# Altium footprint library Vibration_Datalogger.PcbLib: 76 footprints (part 1 of 5)
Each footprint in its own frame and in the unit in brackets; x right, y up, seen from the top. Pads: shape width x height; smd on the part's side, far side on the other; paste and mask are expansions set on the pad; w line width, h text height; cw(c..) or ccw(c..) is an arc to the next point about the centre after c.
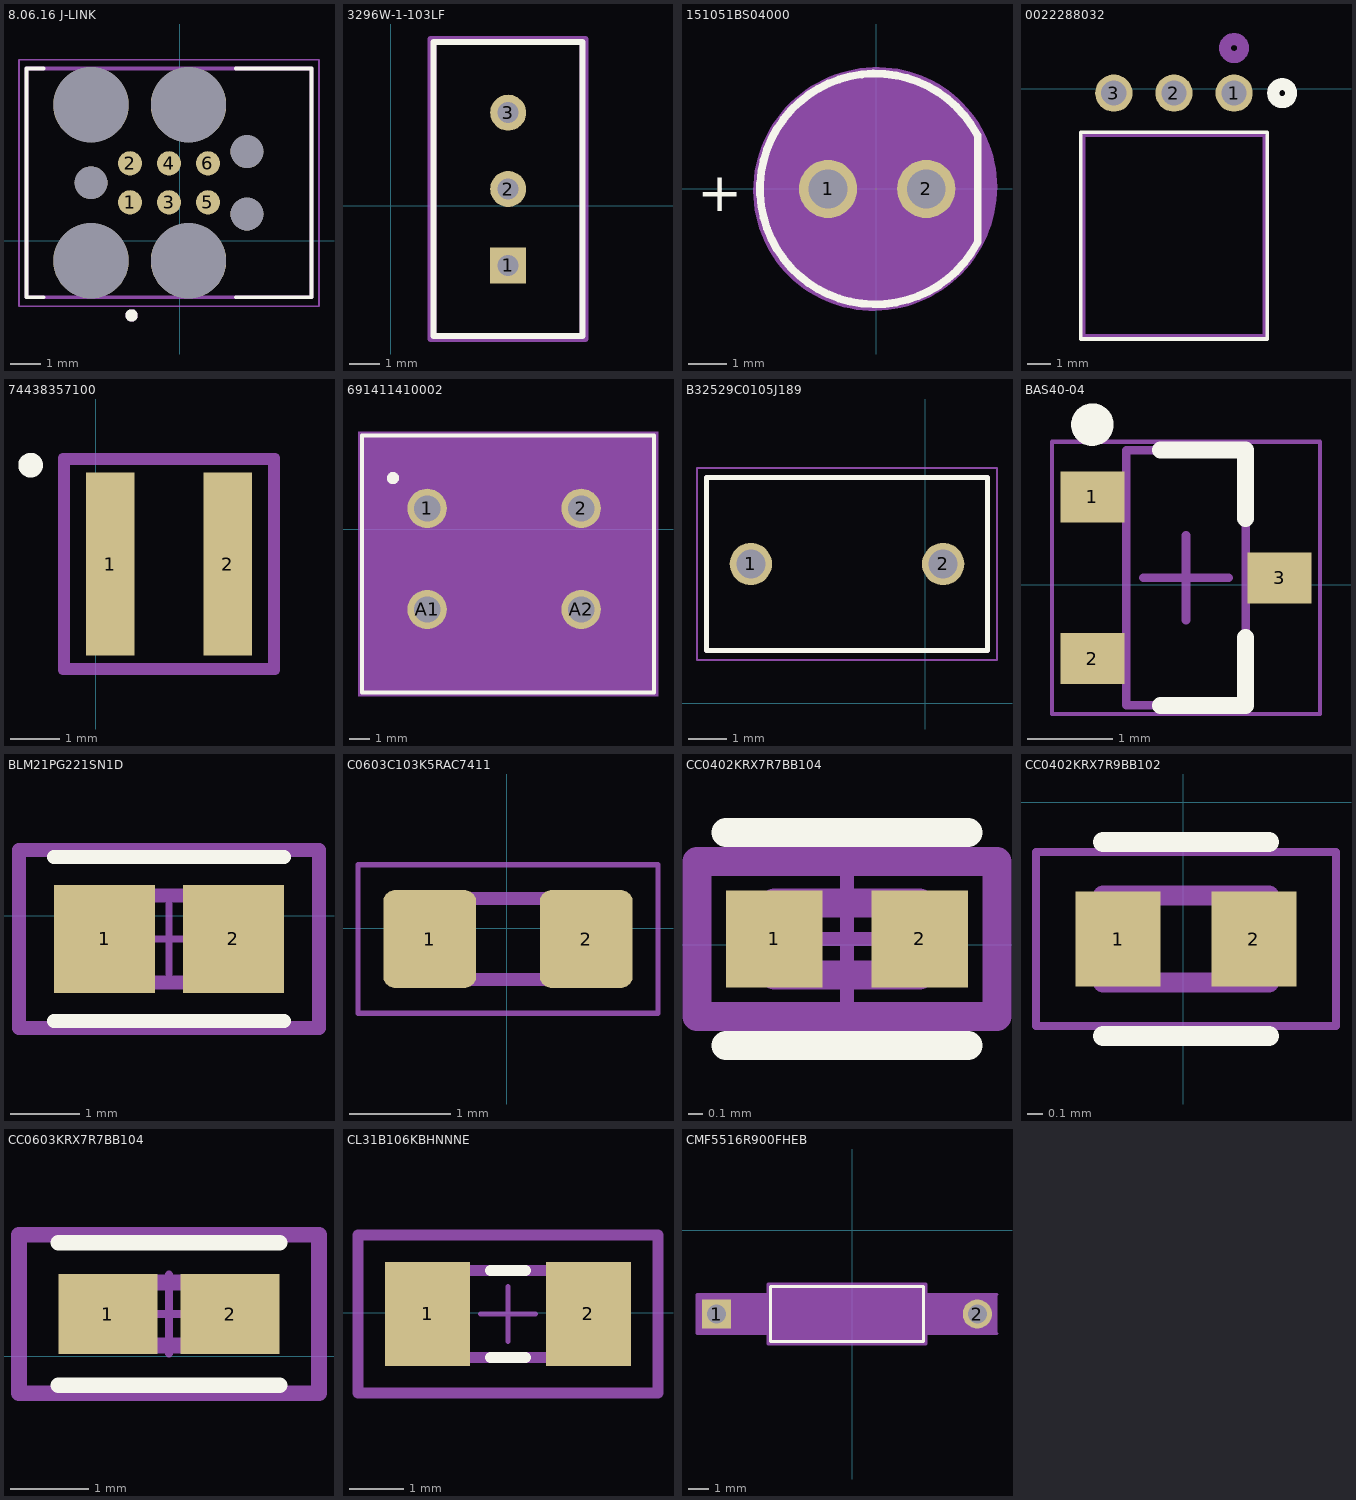
[diagram p0: the footprints below, top view; thin cyan lines are the x and y axes]

## 8.06.16 J-LINK [mm] "6-pin Needle Adapter (8.06.16)"
pads (13):
  round 0.787 smd paste-1: 1(-1.614,1.253) 2(-1.614,2.523) 3(-0.344,1.253) 4(-0.344,2.523) 5(0.926,1.253) 6(0.926,2.523)
  round 2.451 hole 2.451 unplated: ""(-2.884,-0.652) ""(-2.884,4.428) ""(0.291,-0.652) ""(0.291,4.428)
  round 1.067 hole 1.067 unplated: ""(-2.884,1.888) ""(2.196,0.872) ""(2.196,2.904)
Top Overlay:
  circle w0.2: c-1.563,-2.43 r0.1
  lines w0.127: -4.43,-1.839 -4.98,-1.839 -4.98,5.616 -4.43,5.616 ; 1.836,-1.839 4.291,-1.839 4.291,5.616 1.836,5.616
Mechanical 13:
  circle w0.2: c-1.563,-2.43 r0.1
  lines w0.127: -4.98,-1.839 -4.98,5.616 4.291,5.616 4.291,-1.839 -4.98,-1.839
Mechanical 15:
  lines w0.05: -5.23,-2.127 -5.23,5.904 4.541,5.904 4.541,-2.127 -5.23,-2.127

## 3296W-1-103LF [mm] "TRIMMER 10K OHM 0.5W PC PIN TOP"
pads (3):
  rect 1.2x1.2 hole 0.7 paste-1000 mask+0: 1(3.907,-1.979)
  round 1.2 hole 0.7 paste-1000 mask+0: 2(3.907,0.561) 3(3.907,3.101)
Top Overlay:
  lines w0.2: 1.422,-4.329 6.382,-4.329 6.382,5.451 1.422,5.451 1.422,-4.329
Mechanical 5:
  lines w0.2: 1.322,-4.429 6.482,-4.429 6.482,5.551 1.322,5.551 1.322,-4.429
  text ".Designator" at 7.778,-0.963 h1
Mechanical 13:
  lines w0.2: 1.422,-4.329 6.382,-4.329 6.382,5.451 1.422,5.451 1.422,-4.329
Mechanical 15:
  lines w0.2: 1.322,-4.429 6.482,-4.429 6.482,5.551 1.322,5.551 1.322,-4.429
Mechanical 16:
  lines w0.1: 3.402,0.561 4.402,0.561 ; 3.902,0.061 3.902,1.061
3D body "Res_Bourns_3296W-1-501RLF_eec.STEP": height 0.25, standoff 0, extent 1.322,-4.429 6.482,5.551

## 151051BS04000 [mm] "LED BLUE DIFFUSED 5MM ROUND T/H"
pads (2):
  round 1.508 hole 1: 1(-1.245,-0.008) 2(1.295,-0.008)
Top Overlay:
  lines w0.2: 2.614,-1.409 cw(c-0.022,-0.008) 2.614,1.393 ; 2.625,-1.388 2.625,1.372
  text "+" at -4.635,-0.59 h1.02
Mechanical 13:
  circle w0.1: c0.025,-0.008 r2.5
  lines w0.1: 2.518,-1.46 cw(c0.004,-0.008) 2.518,1.444 ; 2.525,-1.448 2.525,1.432
  text "+" at -4.642,-0.577 h1.02
Mechanical 15:
  region: 0.241,3.133 0.401,3.118 0.559,3.095 0.717,3.063 0.872,3.023 1.025,2.975 1.176,2.92 1.323,2.857 1.467,2.786 1.607,2.707 1.743,2.622 1.874,2.53 2,2.431 2.121,2.326 2.237,2.214 2.346,2.097 2.449,1.974 2.546,1.846 2.636,1.713 2.719,1.576 2.795,1.435 2.863,1.289 2.924,1.141 2.977,0.99 3.022,0.836 3.059,0.68 3.088,0.522 3.108,0.363 3.121,0.203 3.125,0.042 3.121,-0.124 3.108,-0.289 3.086,-0.453 3.057,-0.616 3.018,-0.778 2.972,-0.937 2.917,-1.093 2.854,-1.246 2.784,-1.396 2.706,-1.542 2.62,-1.684 2.527,-1.821 2.427,-1.953 2.32,-2.08 2.207,-2.201 2.088,-2.316 1.963,-2.425 1.833,-2.527 1.697,-2.623 1.557,-2.711 1.412,-2.792 1.264,-2.865 1.112,-2.93 0.956,-2.988 0.798,-3.037 0.638,-3.078 0.475,-3.111 0.311,-3.135 0.146,-3.151 -0.024,-3.158 -0.027,-3.158 -0.186,-3.156 -0.349,-3.146 -0.512,-3.127 -0.674,-3.1 -0.834,-3.064 -0.992,-3.02 -1.148,-2.967 -1.3,-2.906 -1.449,-2.838 -1.594,-2.761 -1.735,-2.677 -1.871,-2.585 -2.002,-2.487 -2.128,-2.382 -2.248,-2.27 -2.362,-2.152 -2.47,-2.028 -2.57,-1.898 -2.664,-1.764 -2.751,-1.624 -2.83,-1.481 -2.901,-1.333 -2.965,-1.182 -3.02,-1.027 -3.067,-0.87 -3.106,-0.711 -3.136,-0.549 -3.158,-0.387 -3.171,-0.223 -3.175,-0.059 -3.171,0.11 -3.157,0.279 -3.135,0.447 -3.104,0.613 -3.064,0.778 -3.015,0.94 -2.958,1.1 -2.892,1.256 -2.819,1.408 -2.737,1.557 -2.648,1.701 -2.551,1.84 -2.447,1.973 -2.336,2.101 -2.218,2.223 -2.094,2.339 -1.964,2.447 -1.829,2.549 -1.688,2.644 -1.543,2.731 -1.393,2.81 -1.239,2.881 -1.082,2.943 -0.921,2.998 -0.758,3.043 -0.593,3.081 -0.426,3.109 -0.258,3.128 -0.089,3.139 0.076,3.14
3D body "Download_STP_WL-TMRC-5mm+%28rev1%29.stp": height 18.7, standoff -16.4, extent -3.052,-2.957 2.348,2.942

## 0022288032 [mil] "CONN HEADER R/A 3POS 2.54MM"
pads (3):
  round 62 hole 42: 1(440,-7.64) 2(340,-7.64) 3(240,-7.64)
Top Overlay:
  lines w6: 185,-416.64 495,-416.64 495,-72.64 185,-72.64 185,-416.64
  lines w20: 505,-7.64 ccw(c520,-7.64) 535,-7.64 ccw(c520,-7.64) 505,-7.64
Bottom Overlay:
  lines w20: 505,-7.64 ccw(c520,-7.64) 535,-7.64 ccw(c520,-7.64) 505,-7.64
Mechanical 13:
  lines w6: 190,-411.64 490,-411.64 490,-77.64 190,-77.64 190,-411.64
  lines w20: 425,67.36 ccw(c440,67.36) 455,67.36 ccw(c440,67.36) 425,67.36
3D body "0022288032.stp": height 109, standoff -124, extent 185,-411.64 485,5.36

## 970120154 [mm] "HEX STANDOFF M2.5 BRASS 12MM"
3D body "970120154.stp": height 12, standoff 0, extent -2.897,-2.54 2.877,2.46

## 74438357100 [mm] "10 µH Shielded Molded Inductor 2.7 A"
pads (2):
  rect 0.98x3.7 smd: 1(0.299,-3.586) 2(2.669,-3.586)
Top Overlay:
  circle w0.3: c-1.316,-1.586 r0.1
Mechanical 13:
  lines w0.1: -0.566,-5.636 3.534,-5.636 3.534,-1.536 -0.566,-1.536 -0.566,-5.636
  lines w0.2: -0.666,-5.736 3.634,-5.736 3.634,-1.436 -0.666,-1.436 -0.666,-5.736
3D body "step_temp.STEP": height 3.23, standoff 0.13, extent -0.62,-5.62 3.48,-1.52

## 691411410002 [mm] "TERM BLK 2P SIDE ENT 7.62MM PCB"
pads (4):
  round 1.95 hole 1.3 mask+0.102: 1(6.985,1.036) 2(14.605,1.036) A1(6.985,-3.964) A2(14.605,-3.964)
Top Overlay:
  circle w0.4: c5.295,2.536 r0.1
  lines w0.2: 3.765,-8.064 3.765,4.636 18.205,4.636 18.205,-8.064 3.765,-8.064
Mechanical 13:
  lines w0.1: 3.865,-7.964 3.865,4.536 18.105,4.536 18.105,-7.964 3.865,-7.964
  text "1" at 6.485,-2.064 h1.27
Mechanical 15:
  region: 18.405,-8.264 3.565,-8.264 3.565,4.836 18.405,4.836
3D body "691411410002.stp": height 13.9, standoff -3.6, extent 3.58,-7.95 17.774,4.55

## B32529C0105J189 [mm] "CAP FILM 1UF 5% 63VDC RADIAL"
pads (2):
  round 1.1 hole 0.75: 1(-4.532,3.616) 2(0.468,3.616)
Top Overlay:
  lines w0.127: -5.682,1.366 1.618,1.366 1.618,5.866 -5.682,5.866 -5.682,1.366
Mechanical 13:
  lines w0.127: -5.682,1.366 -5.682,5.866 1.618,5.866 1.618,1.366 -5.682,1.366
Mechanical 15:
  lines w0.05: -5.932,1.116 -5.932,6.116 1.868,6.116 1.868,1.116 -5.932,1.116
3D body "step_temp.STEP": height 9.5, standoff -6, extent -5.682,1.366 1.618,5.866

## BAS40-04 [mm] "DIODE ARR SCHOTT 40V 200MA SOT23"
pads (3):
  rect 0.75x0.6 smd: 1(-3.406,1.032) 2(-3.406,-0.868) 3(-1.206,0.082)
Top Overlay:
  circle w0.25: c-3.406,1.882 r0.125
  lines w0.2: -2.606,-1.418 -1.606,-1.418 -1.606,-0.618 ; -2.606,1.582 -1.606,1.582 -1.606,0.782
Mechanical 13:
  lines w0.1: -3.006,-1.418 -1.606,-1.418 -1.606,1.582 -3.006,1.582 -3.006,-1.418
Mechanical 15:
  lines w0.05: -3.881,-1.518 -0.731,-1.518 -0.731,1.682 -3.881,1.682 -3.881,-1.518
  lines w0.1: -2.806,0.082 -1.806,0.082 ; -2.306,-0.418 -2.306,0.582
3D body: height 1.1, standoff 0.1, extent -3.006,-1.418 -1.606,1.582

## BLM21PG221SN1D [mm] "FERRITE BEAD 220 OHM 0805 1LN"
pads (2):
  rect 1.455x1.556 smd paste+0 mask+0: 1(-4.873,-0.331) 2(-3.021,-0.331)
Top Overlay:
  lines w0.2: -5.6,-1.509 -2.294,-1.509 ; -5.6,0.847 -2.294,0.847
Mechanical 5:
  lines w0.2: -6.1,-1.609 -1.794,-1.609 -1.794,0.947 -6.1,0.947 -6.1,-1.609
  text ".Designator" at -6.106,1.381 h1
Mechanical 13:
  lines w0.2: -4.947,-0.956 -2.947,-0.956 -2.947,0.294 -4.947,0.294 -4.947,-0.956
Mechanical 15:
  lines w0.2: -6.1,-1.609 -1.794,-1.609 -1.794,0.947 -6.1,0.947 -6.1,-1.609
Mechanical 16:
  lines w0.1: -4.447,-0.331 -3.447,-0.331 ; -3.947,-0.831 -3.947,0.169
3D body "FBead_Murata_BLM21AG102SN1D_eec.STEP": height 0.25, standoff 0, extent -6.1,-1.609 -1.794,0.947

## C0603C103K5RAC7411 [mm] "CAP CER 10000PF 50V X7R 0603"
pads (2):
  rrect25% 0.92x0.97 smd: 1(-0.764,-0.104) 2(0.786,-0.104)
Mechanical 13:
  lines w0.127: -0.789,-0.504 -0.789,0.296 0.811,0.296 0.811,-0.504 -0.789,-0.504
Mechanical 15:
  lines w0.05: -1.474,-0.839 -1.474,0.631 1.496,0.631 1.496,-0.839 -1.474,-0.839
3D body "step_temp.STEP": height 0.9, standoff 0, extent -0.789,-0.504 0.811,0.296

## CC0402KRX7R7BB104 [mm] "CAP CER 0.1UF 16V X7R 0402"
pads (2):
  rect 0.668x0.672 smd paste+0 mask+0: 1(-2.808,0.04) 2(-1.804,0.04)
Top Overlay:
  lines w0.2: -3.142,-0.696 -1.47,-0.696 ; -3.142,0.776 -1.47,0.776
Mechanical 5:
  lines w0.2: -3.342,-0.496 -1.27,-0.496 -1.27,0.576 -3.342,0.576 -3.342,-0.496
  text ".Designator" at -4.56,1.258 h1
Mechanical 13:
  lines w0.2: -2.806,-0.21 -1.806,-0.21 -1.806,0.29 -2.806,0.29 -2.806,-0.21
Mechanical 15:
  lines w0.2: -3.342,-0.496 -1.27,-0.496 -1.27,0.576 -3.342,0.576 -3.342,-0.496
Mechanical 16:
  lines w0.1: -2.806,0.04 -1.806,0.04 ; -2.306,-0.46 -2.306,0.54
3D body "Cap_YAGEO_CC0402KRX7R9BB101_eec.STEP": height 0.25, standoff 0, extent -3.342,-0.496 -1.27,0.576

## CC0402KRX7R9BB102 [mm] "CAP CER 1000PF 50V X7R 0402"
pads (2):
  rect 0.54x0.6 smd: 1(-0.413,-0.867) 2(0.447,-0.867)
Top Overlay:
  lines w0.127: -0.508,-1.482 0.542,-1.482 ; -0.508,-0.252 0.542,-0.252
Mechanical 13:
  lines w0.127: -0.508,-1.142 -0.508,-0.592 0.542,-0.592 0.542,-1.142 -0.508,-1.142
Mechanical 15:
  lines w0.05: -0.933,-1.417 -0.933,-0.317 0.967,-0.317 0.967,-1.417 -0.933,-1.417
3D body "step_temp.STEP": height 0.55, standoff 0, extent -0.483,-1.117 0.517,-0.617

## CC0603KRX7R7BB104 [mm] "CAP CER 0.1UF 16V X7R 0603"
pads (2):
  rect 1.258x1.012 smd paste+0 mask+0: 1(-4.079,0.538) 2(-2.525,0.538)
Top Overlay:
  lines w0.2: -4.708,-0.368 -1.896,-0.368 ; -4.708,1.444 -1.896,1.444
Mechanical 5:
  lines w0.2: -5.208,-0.468 -1.396,-0.468 -1.396,1.544 -5.208,1.544 -5.208,-0.468
  text ".Designator" at -5.461,1.869 h1
Mechanical 13:
  lines w0.2: -4.102,0.138 -2.502,0.138 -2.502,0.938 -4.102,0.938 -4.102,0.138
Mechanical 15:
  lines w0.2: -5.208,-0.468 -1.396,-0.468 -1.396,1.544 -5.208,1.544 -5.208,-0.468
Mechanical 16:
  lines w0.1: -3.802,0.538 -2.802,0.538 ; -3.302,0.038 -3.302,1.038
3D body "Cap_YAGEO_CC0603KRX7R9BB271_eec.STEP": height 0.25, standoff 0, extent -5.208,-0.468 -1.396,1.544

## CL31B106KBHNNNE [mm] "CAP CER 10UF 50V X7R 1206"
pads (2):
  rect 1.554x1.906 smd paste+0 mask+0: 1(-4.998,-0.02) 2(-2.046,-0.02)
Top Overlay:
  lines w0.2: -3.846,-0.82 -3.198,-0.82 ; -3.846,0.78 -3.198,0.78
Mechanical 5:
  lines w0.2: -6.275,-1.473 -0.769,-1.473 -0.769,1.433 -6.275,1.433 -6.275,-1.473
  text ".Designator" at -5.73,1.788 h1
Mechanical 13:
  lines w0.2: -5.122,-0.82 -1.922,-0.82 -1.922,0.78 -5.122,0.78 -5.122,-0.82
Mechanical 15:
  lines w0.2: -6.275,-1.473 -0.769,-1.473 -0.769,1.433 -6.275,1.433 -6.275,-1.473
Mechanical 16:
  lines w0.1: -4.022,-0.02 -3.022,-0.02 ; -3.522,-0.52 -3.522,0.48
3D body "Cap_Samsung_CL31B106KBHNNNE_eec.STEP": height 0.25, standoff 0, extent -6.275,-1.473 -0.769,1.433

## CMF5516R900FHEB [mil] "RES 16.9 OHM 1/2W 1% AXIAL"
pads (2):
  rect 57x57 hole 37 paste-28.5 mask+0: 1(-265.39,-164.21)
  round 57 hole 37 paste-28.5 mask+0: 2(244.61,-164.21)
Top Overlay:
  lines w6: -160.39,-218.21 139.61,-218.21 139.61,-110.21 -160.39,-110.21 -160.39,-218.21
Mechanical 13:
  lines w1: -265.39,-164.21 -155.39,-164.21 ; 134.61,-164.21 244.61,-164.21 ; -155.39,-213.21 134.61,-213.21 134.61,-115.21 -155.39,-115.21 -155.39,-213.21
  text ".Designator" at -251.97,-77.17 h50
Mechanical 15:
  region: -165.39,-202.71 -303.89,-202.71 -303.89,-125.71 -165.39,-125.71 -165.39,-105.21 144.61,-105.21 144.61,-125.71 283.11,-125.71 283.11,-202.71 144.61,-202.71 144.61,-223.21 -165.39,-223.21
  lines w6: 283.11,-202.71 144.61,-202.71 144.61,-223.21 -165.39,-223.21 -165.39,-202.71 -303.89,-202.71 -303.89,-125.71 -165.39,-125.71 -165.39,-105.21 144.61,-105.21 144.61,-125.71 283.11,-125.71
3D body "RES_CMF07_VIS.step": height 98.02, standoff -110, extent -278.9,-212.86 258.11,-115.57